# EAGLE library part SYN-OPAMP2 (library pipeline_opamp2)
SYN-OPAMP2 Synthetic dual op-amp, 2 amplifier units plus power unit Source: JLCEDA/EasyEDA Official Library (https://lceda.cn/ , https://easyeda.com). Copyright of the library data belongs to JLCEDA/EasyEDA.
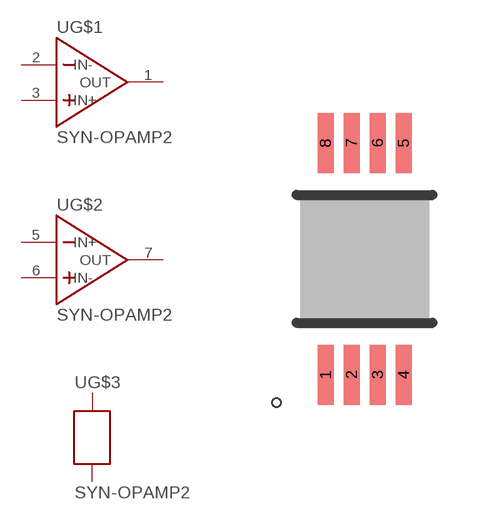
[diagram p0: symbol with the pads of SYN-TSSOP-8; footprint SYN-TSSOP-8]

Designator prefix U; gates G$1=SYN-OPAMP2_1 G$2=SYN-OPAMP2_2 G$3=SYN-OPAMP2_3

## SYN-OPAMP2 (JLCPCB_CLASS: Basic Part; LCSC_PACKAGE: SYN-TSSOP-8; LCSC_PART: C9000014; MANUFACTURER: SYN-Maker; MPN: SYN-OPAMP2; SOURCE: Source: JLCEDA/EasyEDA Official Library (https://lceda.cn/ , https://easyeda.com). Copyright of the library data belongs to JLCEDA/EasyEDA.)  [SYN-TSSOP-8]
1  G$1:OUT  out
2  G$1:IN-  in
3  G$1:IN+  in
4  G$3:V-  pwr
5  G$2:IN+  in
6  G$2:IN-  in
7  G$2:OUT  out
8  G$3:V+  pwr

## Footprint SYN-TSSOP-8 (pad centres in mm)
SYN-TSSOP-8
smd 0.4 x 1.5: 1 -0.975,-2.9; 2 -0.325,-2.9; 3 0.325,-2.9; 4 0.975,-2.9; 5 0.975,2.9; 6 0.325,2.9; 7 -0.325,2.9; 8 -0.975,2.9